# Altium footprint library Power.PcbLib: 21 footprints (part 1 of 2)
Each footprint in its own frame and in the unit in brackets; x right, y up, seen from the top. Pads: shape width x height; smd on the part's side, far side on the other; paste and mask are expansions set on the pad; w line width, h text height; cw(c..) or ccw(c..) is an arc to the next point about the centre after c.
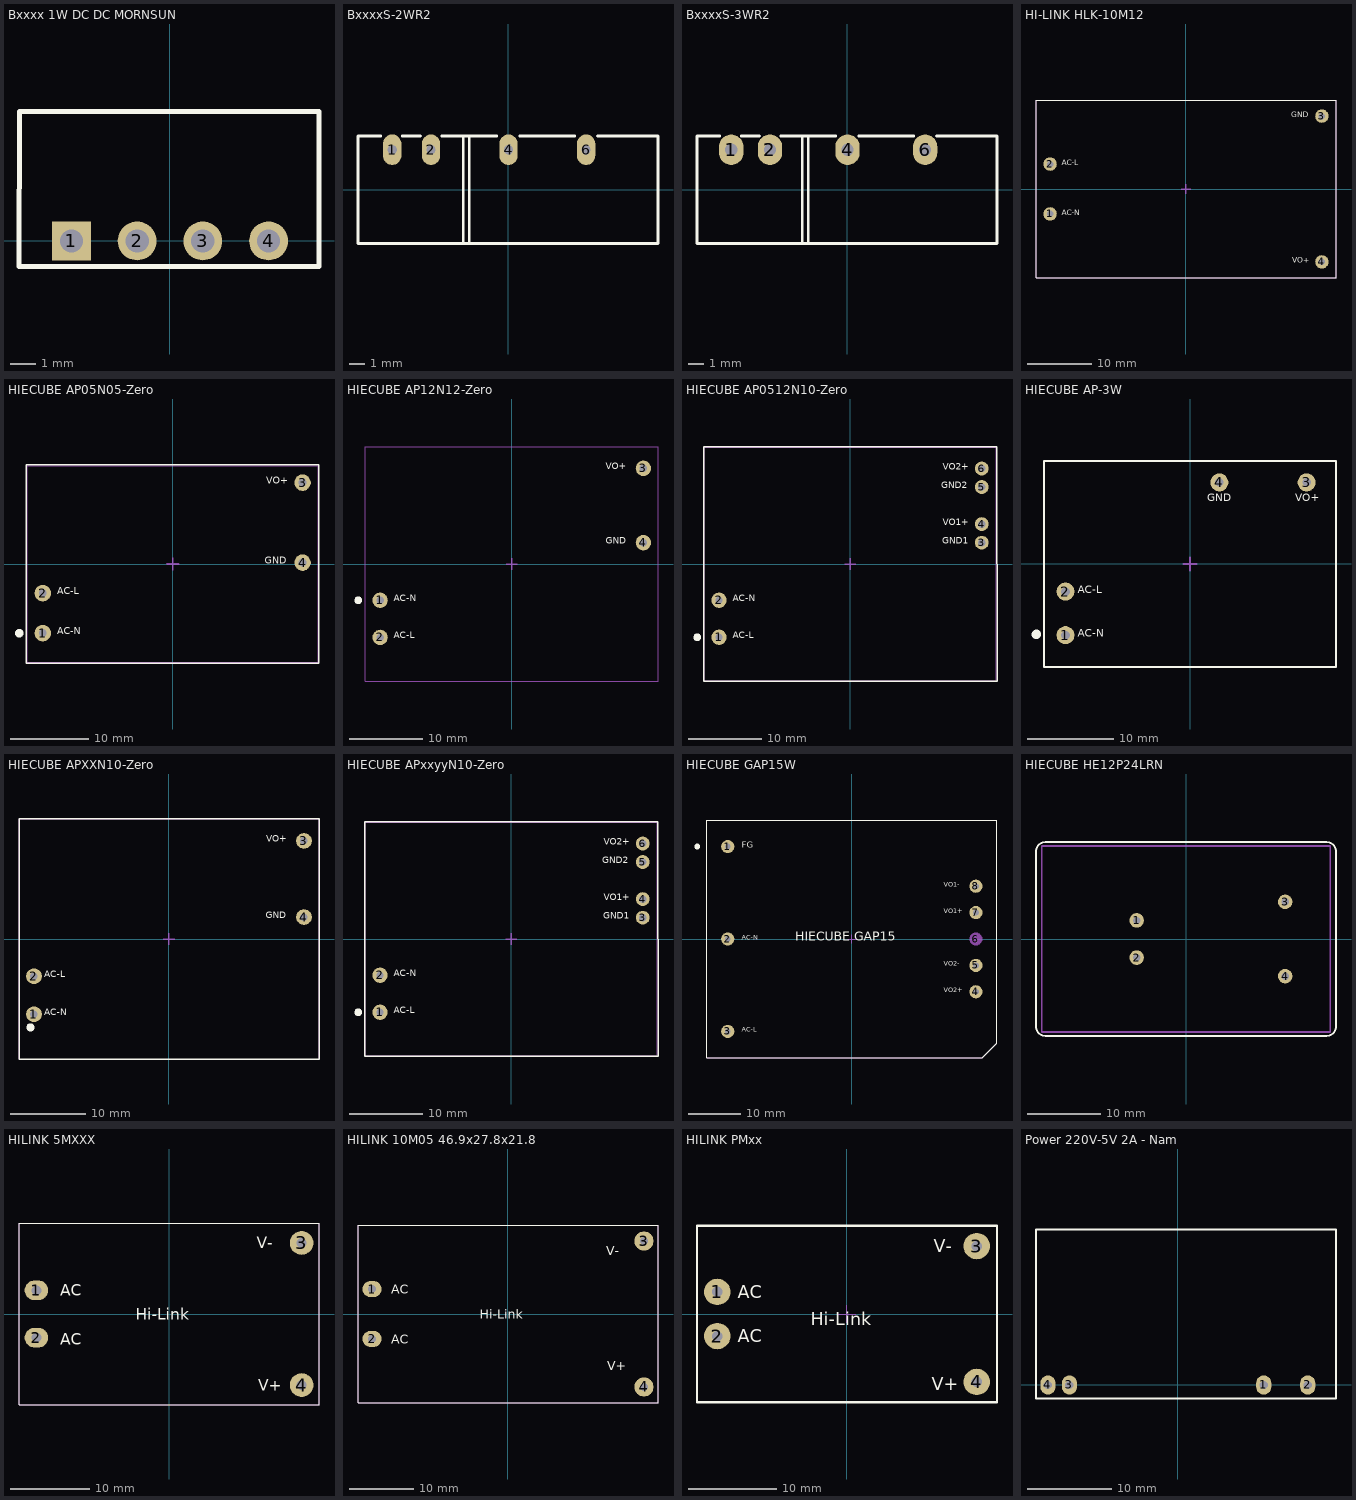
[diagram p0: the footprints below, top view; thin cyan lines are the x and y axes]

## Bxxxx 1W DC DC MORNSUN [mm] "B0505 B0512 B1212 MORNSUN"
pads (4):
  rect 1.5x1.5 hole 0.9: 1(-3.81,0)
  round 1.5 hole 0.9: 2(-1.27,0) 3(1.27,0) 4(3.81,0)
Top Overlay:
  lines w0.2: -5.838,-0.991 -5.825,5.009 5.762,5.009 5.762,-0.991 -5.838,-0.991
Top Designator:
  text ".Designator" at -3.748,1.665 h1.52
3D body "DC_DC_ISO_B_S_1W.stp": height 10, standoff -4.1, extent -5.8,-0.92 5.8,5.08

## BxxxxS-2WR2 [mm]
pads (4):
  oval 1.2x2 hole 0.6: 1(-7.585,2.625) 2(-5.045,2.625) 4(0.035,2.625) 6(5.115,2.625)
Top Overlay:
  lines w0.178: -8.335,3.525 -9.825,3.525 -9.825,-3.525 9.825,-3.525 9.825,3.525 5.865,3.525 ; -6.935,3.525 -5.735,3.525 ; -4.335,3.525 -0.735,3.525 ; -2.935,-3.475 -2.935,3.525 ; -2.535,-3.475 -2.535,3.525 ; 0.765,3.525 4.365,3.525
Top Designator:
  text ".Designator" at -3.71,-0.288 h1.52
Mechanical 15:
  text "+Vo" at 3.7,3.263 h0.8
  text "0V" at 1.1,3.047 h0.8
  text "GND" at -6.3,3.384 h0.8
  text "Vin" at -8.9,3.157 h0.8
3D body "B1205S-2W.STEP": height 10.01, standoff -4.09, extent -9.75,-3.5 9.75,3.5

## BxxxxS-3WR2 [mm]
pads (4):
  oval 1.6x2 hole 0.8: 1(-7.585,2.625) 2(-5.045,2.625) 4(0.035,2.625) 6(5.115,2.625)
Top Overlay:
  lines w0.178: -8.335,3.525 -9.825,3.525 -9.825,-3.525 9.825,-3.525 9.825,3.525 5.865,3.525 ; -6.935,3.525 -5.735,3.525 ; -4.335,3.525 -0.735,3.525 ; -2.935,-3.475 -2.935,3.525 ; -2.535,-3.475 -2.535,3.525 ; 0.765,3.525 4.365,3.525
Top Designator:
  text ".Designator" at -3.71,-0.288 h1.52
Mechanical 15:
  text "+Vo" at 3.7,3.263 h0.8
  text "0V" at 1.1,3.047 h0.8
  text "GND" at -6.3,3.384 h0.8
  text "Vin" at -8.9,3.157 h0.8
3D body "B1212S-3W.STEP": height 10.16, standoff -3.1, extent -9.825,-3.525 9.825,3.525

## HI-LINK HLK-10M12 [mm] "46.9*27.8*21.8mm"
pads (4):
  round 2.1 hole 1: 1(-21.25,-3.9) 2(-21.25,3.9) 3(21.25,11.4) 4(21.25,-11.4)
Top Overlay:
  lines w0.178: -23.45,-13.9 23.45,-13.9 23.45,13.9 -23.45,13.9 -23.45,-13.9
  text "VO+" at 16.637,-11.88 h1.5
  text "GND" at 16.453,10.92 h1.5
  text "AC-L" at -19.402,3.419 h1.5
  text "AC-N" at -19.402,-4.381 h1.5
Top Designator:
  text ".Designator" at -4.383,-0.344 h1.52
Mechanical 15:
  lines w0.1: -23.45,-13.9 23.45,-13.9 23.45,13.9 -23.45,13.9 -23.45,-13.9
  lines w0.2: -0.762,0 0.762,0 ; 0,-0.762 0,0.762
3D body "HI-LINK HLK-10M12.STEP": height 21.8, standoff -5, extent -23.45,-13.9 23.45,13.9

## HIECUBE AP05N05-Zero [mm] "37*25*20mm"
pads (4):
  round 2.1 hole 1: 1(-16.5,-8.78) 2(-16.5,-3.7) 3(16.5,10.34) 4(16.5,0.18)
Top Overlay:
  circle w1: c-19.484,-8.78 r0.04
  lines w0.178: -18.589,-12.589 18.589,-12.589 18.589,12.589 -18.589,12.589 -18.589,-12.589
  text "AC-L" at -14.652,-4.181 h1.5
  text "AC-N" at -14.652,-9.261 h1.5
  text "GND" at 11.703,-0.3 h1.5
  text "VO+" at 11.887,9.86 h1.5
Top Designator:
  text ".Designator" at -4.383,-0.344 h1.52
Mechanical 15:
  lines w0.1: -18.5,-12.5 18.5,-12.5 18.5,12.5 -18.5,12.5 -18.5,-12.5
  lines w0.2: -0.762,0 0.762,0 ; 0,-0.762 0,0.762
3D body "AP05N05-ZERO.stp": height 20.1, standoff -5, extent -18.5,-12.5 18.5,12.5

## HIECUBE AP12N12-Zero [mm] "40*32*16mm"
pads (4):
  round 2.1 hole 1: 1(-18,-4.96) 2(-18,-10.04) 3(18,13.08) 4(18,2.92)
Top Overlay:
  circle w1: c-20.984,-4.96 r0.04
  text "AC-L" at -16.152,-10.521 h1.5
  text "AC-N" at -16.152,-5.441 h1.5
  text "GND" at 12.848,2.44 h1.5
  text "VO+" at 12.848,12.6 h1.5
Top Designator:
  text ".Designator" at -4.447,-0.344 h1.52
Mechanical 15:
  lines w0.1: -20,-16 20,-16 20,16 -20,16 -20,-16
  lines w0.2: -0.762,0 0.762,0 ; 0,-0.762 0,0.762
3D body: height 16, standoff 0, extent -20,-16 20,16

## HIECUBE AP0512N10-Zero [mm] "40*32*16.5mm"
pads (6):
  round 2.1 hole 1: 1(-18,-10.04) 2(-18,-4.96)
  round 1.9 hole 1: 3(18,2.92) 4(18,5.46) 5(18,10.54) 6(18,13.08)
Top Overlay:
  circle w1: c-20.984,-10.04 r0.04
  lines w0.178: -20.089,-16.089 20.089,-16.089 20.089,16.089 -20.089,16.089 -20.089,-16.089
  text "AC-N" at -16.152,-5.441 h1.5
  text "AC-L" at -16.152,-10.521 h1.5
  text "GND1" at 12.609,2.44 h1.5
  text "VO1+" at 12.641,4.98 h1.5
  text "GND2" at 12.458,10.06 h1.5
  text "VO2+" at 12.641,12.6 h1.5
Top Designator:
  text ".Designator" at -4.383,-0.344 h1.52
Mechanical 15:
  lines w0.1: -20,-16 20,-16 20,16 -20,16 -20,-16
  lines w0.2: -0.762,0 0.762,0 ; 0,-0.762 0,0.762
3D body: height 16.5, standoff 0, extent -20,-16 20,16

## HIECUBE AP-3W [mm] "34*24*16.5mm"
pads (4):
  round 2.1 hole 1: 1(-14.5,-8.29) 2(-14.5,-3.21) 3(13.58,9.5) 4(3.42,9.5)
Top Overlay:
  circle w1: c-17.895,-8.191 r0.04
  lines w0.254: -17,-12 17,-12 17,12 -17,12 -17,-12
  text "VO+" at 12.248,7.018 h1.5
  text "AC-N" at -13.063,-8.771 h1.5
  text "AC-L" at -13.063,-3.691 h1.5
  text "GND" at 1.996,7.018 h1.5
Top Designator:
  text ".Designator" at -4.364,-0.344 h1.52
Mechanical 15:
  lines w0.2: -0.762,0 0.762,0 ; 0,-0.762 0,0.762
3D body: height 16.5, standoff 0, extent -17,-12 17,12

## HIECUBE APXXN10-Zero [mm] "40*32*16mm"
pads (4):
  round 2.1 hole 1: 1(-18,-10.04) 2(-18,-4.96) 3(18,13.08) 4(18,2.92)
Top Overlay:
  circle w1: c-18.484,-11.78 r0.04
  lines w0.178: -20,-16 -20,16 20,16 20,-16 -20,-16
  text "GND" at 12.908,2.44 h1.5
  text "VO+" at 13,12.6 h1.5
  text "AC-N" at -16.652,-10.521 h1.5
  text "AC-L" at -16.652,-5.441 h1.5
Top Designator:
  text ".Designator" at -3.71,-0.344 h1.52
Mechanical 15:
  lines w0.1: -20,-16 -20,16 20,16 20,-16 -20,-16
  lines w0.2: -0.762,0 0.762,0 ; 0,-0.762 0,0.762
3D body: height 16, standoff 0, extent -20,-16 20,16

## HIECUBE APxxyyN10-Zero [mm] "40*32*16.5mm"
pads (6):
  round 2.1 hole 1: 1(-18,-10.04) 2(-18,-4.96)
  round 1.9 hole 1: 3(18,2.92) 4(18,5.46) 5(18,10.54) 6(18,13.08)
Top Overlay:
  circle w1: c-20.984,-10.04 r0.04
  lines w0.178: -20.089,-16.089 20.089,-16.089 20.089,16.089 -20.089,16.089 -20.089,-16.089
  text "AC-N" at -16.152,-5.441 h1.5
  text "AC-L" at -16.152,-10.521 h1.5
  text "GND1" at 12.609,2.44 h1.5
  text "VO1+" at 12.641,4.98 h1.5
  text "GND2" at 12.458,10.06 h1.5
  text "VO2+" at 12.641,12.6 h1.5
Top Designator:
  text ".Designator" at -4.383,-0.344 h1.52
Mechanical 15:
  lines w0.1: -20,-16 20,-16 20,16 -20,16 -20,-16
  lines w0.2: -0.762,0 0.762,0 ; 0,-0.762 0,0.762
3D body: height 16.5, standoff 0, extent -20,-16 20,16

## HIECUBE GAP15W [mm] "55*45*21mm"
pads (8):
  round 2.5 hole 1.1: 1(-23.5,17.5) 2(-23.5,0) 3(-23.5,-17.5) 4(23.5,-10) 5(23.5,-5) 7(23.5,5) 8(23.5,10)
  round 2.5 on Mech15: 6(23.5,0)
Top Overlay:
  circle w1: c-29.278,17.5 r0.04
  lines w0.2: -27.5,-22.5 24.7,-22.5 27.5,-19.7 27.5,22.5 -27.5,22.5 -27.5,-22.5
  text "AC-N" at -20.852,-0.481 h1.5
  text "VO1-" at 17.441,9.52 h1.5
  text "FG" at -20.852,16.835 h2
  text "VO2+" at 17.441,-10.48 h1.5
  text "VO2-" at 17.441,-5.48 h1.5
  text "VO1+" at 17.441,4.52 h1.5
  text "AC-L" at -20.852,-17.981 h1.5
  text "HIECUBE GAP15" at -10.689,-1 h3
Top Designator:
  text ".Designator" at -4.819,-0.344 h1.52
Mechanical 15:
  lines w0.1: -27.5,-22.5 24.7,-22.5 27.5,-19.7 27.5,22.5 -27.5,22.5 -27.5,-22.5
  lines w0.2: -0.762,0 0.762,0 ; 0,-0.762 0,0.762
  text "NO" at 19.236,-0.48 h1.5
3D body: height 21, standoff 0, extent -27.5,-22.5 27.5,22.5

## HIECUBE HE12P24LRN [mm] "25.5*39.5*22mm"
pads (4):
  round 2 hole 1: 1(-6.75,2.54) 2(-6.75,-2.54) 3(13.57,5.08) 4(13.57,-5.08)
Top Overlay:
  lines w0.254: -20.528,-11.982 ccw(c-19.258,-11.982) -19.258,-13.252 -12.745,-13.252 19.258,-13.252 ccw(c19.258,-11.982) 20.528,-11.982 20.528,-9.143 20.528,11.982 ccw(c19.258,11.982) 19.258,13.252 -19.258,13.252 ccw(c-19.258,11.982) -20.528,11.982 -20.528,4.699 -20.528,-11.982
Mechanical 10:
  lines w0.254: -19.75,-12.75 19.75,-12.75 19.75,12.75 -19.75,12.75 -19.75,-12.75
3D body "HE12P24LRN.STEP": height 22, standoff -4.6, extent -19.75,-12.75 19.75,12.75

## HILINK 5MXXX [mm]
pads (4):
  oval 3x2.5 hole 1.27: 1(-16.8,3) 2(-16.8,-3)
  round 3 hole 1.27: 3(16.8,9) 4(16.8,-9)
Top Overlay:
  lines w0.127: -19,-11.5 19,-11.5 19,11.5 -19,11.5 -19,-11.5
  text "V+" at 11.3,-9.7 h1.43
  text "V-" at 11.1,8.3 h1.43
  text "AC" at -13.8,-3.9 h1.43
  text "AC" at -13.8,2.3 h1.43
  text "Hi-Link" at -4.2,-0.7 h1.43
Top Designator:
  text ".Designator" at -3.692,-0.326 h1.52
Mechanical 13:
  lines w0.127: -19,-11.5 -19,11.5 19,11.5 19,-11.5 -19,-11.5
3D body "HLK-5M05.stp": height 18.01, standoff -3.1, extent -18.9,-11.4 19.1,11.6

## HILINK 10M05 46.9x27.8x21.8 [mm] "10Mxx"
pads (4):
  oval 3x2.5 hole 1.27: 1(-21.25,3.9) 2(-21.25,-3.9)
  round 3 hole 1.27: 3(21.25,11.4) 4(21.25,-11.4)
Top Overlay:
  lines w0.127: -23.45,-13.9 23.45,-13.9 23.45,13.9 -23.45,13.9 -23.45,-13.9
  text "AC" at -18.25,-4.614 h1.43
  text "V+" at 15.537,-8.814 h1.43
  text "V-" at 15.337,9.186 h1.43
  text "AC" at -18.25,3.2 h1.43
  text "Hi-Link" at -4.404,-0.714 h1.43
Top Designator:
  text ".Designator" at -3.71,-0.344 h1.52
Mechanical 13:
  lines w0.127: -23.45,-13.9 -23.45,13.9 23.45,13.9 23.45,-13.9 -23.45,-13.9
3D body "HLK-10M05 v6.step": height 18.11, standoff -5, extent -23.45,-13.9 23.45,13.9

## HILINK PMxx [mm]
pads (4):
  round 3 hole 1.2: 1(-14.7,2.5) 2(-14.7,-2.5) 3(14.7,7.7) 4(14.7,-7.7)
Top Overlay:
  lines w0.254: -17,-10 17,-10 17,10 -17,10 -17,-10
  text "V+" at 9.588,-8.668 h1.43
  text "AC" at -12.383,-3.214 h1.43
  text "AC" at -12.383,1.786 h1.43
  text "Hi-Link" at -4.127,-1.27 h1.43
  text "V-" at 9.842,6.986 h1.43
Top Designator:
  text ".Designator" at -3.71,-0.344 h1.52
Mechanical 15:
  lines w0.1: -1,0 1,0 ; 0,-1 0,1
3D body "User Library-hilink.STEP": height 15.01, standoff -5, extent -17.063,-10.1 16.937,10.1

## Power 220V-5V 2A - Nam [mil]
pads (4):
  oval 70x90 hole 39.37: 1(400.24,0) 2(605.24,0) 3(-505.24,0) 4(-605.24,0)
Top Overlay:
  lines w10: -660.79,-62.99 -660.79,724.41 736.85,724.41 736.85,-62.99 -660.79,-62.99
Top Designator:
  text ".Designator" at -108.04,317.17 h60
3D body "PCB1.step": height 570.26, standoff -94.05, extent -660.79,-62.99 736.85,724.41